# Altium schematic symbol library CNY65.SchLib: 1 symbol
Pins are listed as number, name and electrical type; pins without a type are passive.

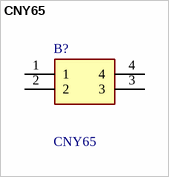
[diagram p0: symbol CNY65]

## CNY65
designator B?
Optocoupler Transistor O/P 1-ch PDIP4; Manufacturer_Name: Vishay; Geometry.Height: 6.2mm; Mouser Part Number: 78-CNY65; Mouser Price/Stock: https://www.mouser.co.uk/ProductDetail/Vishay-Semiconductors/CNY65?qs=JrSo%252BAIZiDHPFQFPHHovcg%3D%3D; Manufacturer_Part_Number: CNY65; Datasheet Link: https://www.vishay.com/docs/83540/cny64.pdf
footprint DIPS1524W40P762L960H620Q4N
pins: 1, 2, 3, 4